# Altium schematic symbol library 2.2 µF, 16 V, X7R, 0805.SchLib: 1 symbol
Pins are listed as number, name and electrical type; pins without a type are passive.

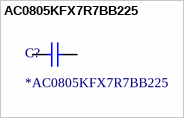
[diagram p0: symbol AC0805KFX7R7BB225]

## AC0805KFX7R7BB225
designator C?, comment *AC0805KFX7R7BB225
2.2 µF, 16 V, X7R, 0805; Supplier 1: Avnet; Supplier Part Number 1: AC0805KFX7R7BB225; JLCPCB Part #: C20143097
footprint C_0805_2012Metric (Chip Ceramic Capacitor, 2-Leads, Body 2.00x1.25mm, IPC Medium Density, Samsung 0805 Reference)
pins: 1, 2